# Altium footprint library SYNCBOX.PcbLib: 77 footprints (part 5 of 5)
Each footprint in its own frame and in the unit in brackets; x right, y up, seen from the top. Pads: shape width x height; smd on the part's side, far side on the other; paste and mask are expansions set on the pad; w line width, h text height; cw(c..) or ccw(c..) is an arc to the next point about the centre after c.
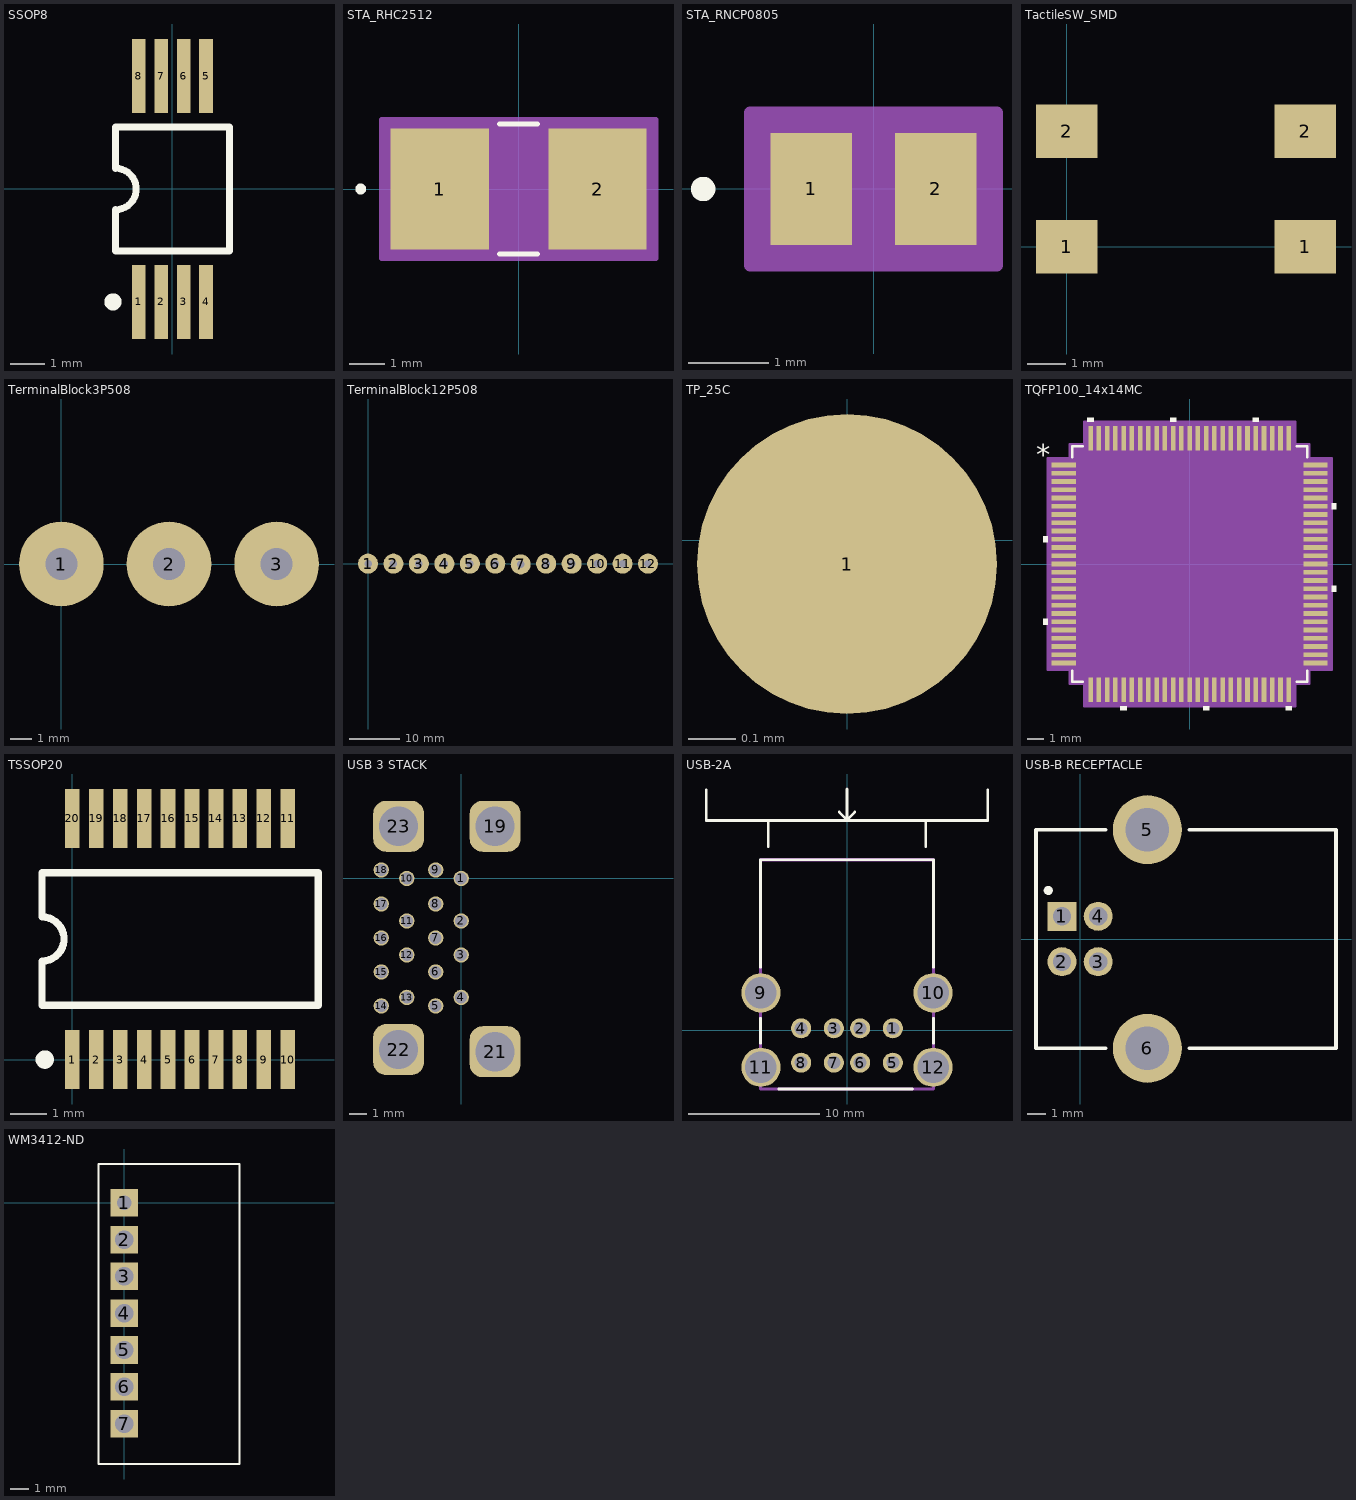
[diagram p4: the footprints below, top view; thin cyan lines are the x and y axes]

## SSOP8 [mm]
pads (8):
  rect 0.4x2.15 smd: 1(-0.975,-3.275) 2(-0.325,-3.275) 3(0.325,-3.275) 4(0.975,-3.275) 5(0.975,3.275) 6(0.325,3.275) 7(-0.325,3.275) 8(-0.975,3.275)
Top Overlay:
  circle w0.25: c-1.725,-3.275 r0.125
  lines w0.2: -1.65,-1.8 -1.65,-0.6 ccw(c-1.65,0) -1.65,0.6 -1.65,1.8 1.65,1.8 1.65,-1.8 -1.65,-1.8

## STA_RHC2512 [mil]
pads (2):
  rect 109x134 smd paste+0 mask+0: 1(-87.5,0) 2(87.5,0)
Top Overlay:
  circle w6: c-175,0 r3
  lines w6: -20.89,-72 20.89,-72 ; -20.89,72 20.89,72
Mechanical 13:
  circle w0: c-82.5,0 r3
  lines w1: -128,-67 -128,67 ; -128,-67 -33,-67 -33,67 -128,67 ; -128,-67 128,-67 ; -128,-67 -128,67 ; -128,67 128,67 ; 128,-67 33,-67 33,67 128,67 ; 128,-67 128,67 ; 128,-67 128,67
Mechanical 15:
  region: 152,-77 -152,-77 -152,77 152,77
  lines w6: -152,-77 -152,77 152,77 152,-77 -152,-77
3D body: height 10, standoff 0, extent 0,0 10,10
3D body "STA_RHC2512.stp": height 27.99, standoff 0, extent -127.99,-67 128,67.01

## STA_RNCP0805 [mil]
pads (2):
  rect 40x55 smd paste+0 mask+0: 1(-30.5,0) 2(30.5,0)
Top Overlay:
  circle w6: c-83.5,0 r3
Mechanical 13:
  circle w0: c-25.5,0 r3
  lines w1: -42.5,-27.5 -42.5,27.5 ; -42.5,-27.5 42.5,-27.5 ; -42.5,-27.5 -10.5,-27.5 -10.5,27.5 -42.5,27.5 ; -42.5,-27.5 -42.5,27.5 ; -42.5,27.5 42.5,27.5 ; 42.5,-27.5 42.5,27.5 ; 42.5,-27.5 42.5,27.5 ; 42.5,-27.5 10.5,-27.5 10.5,27.5 42.5,27.5
Mechanical 15:
  region: 60.5,-37.5 -60.5,-37.5 -60.5,37.5 60.5,37.5
  lines w6: -60.5,-37.5 60.5,-37.5 60.5,37.5 -60.5,37.5 -60.5,-37.5
3D body "STA_RNCP0805.stp": height 24.02, standoff 0, extent -42.52,-27.48 42.52,27.48
3D body: height 10, standoff 0, extent 0,0 10,10

## TactileSW_SMD [mm]
pads (4):
  rect 1.6x1.4 smd: 1(0,0) 1(6.2,0) 2(0,3) 2(6.2,3)
3D body "TL3305AFxxxxG.stp": height 3.7, standoff -0.1, extent -0.651,-0.751 6.849,3.749

## TerminalBlock3P508 [mm]
pads (3):
  round 4 hole 1.5: 1(0,0) 2(5.08,0) 3(10.16,0)

## TerminalBlock12P508 [mm]
pads (12):
  round 4 hole 1.5: 1(0,0) 2(5.08,0) 3(10.16,0) 4(15.24,0) 5(20.32,0) 6(25.4,0) 7(30.48,-0.15) 8(35.56,0) 9(40.64,0) 10(45.72,0) 11(50.8,0) 12(55.88,0)
3D body "395321012.stp": height 8.38, standoff -3.81, extent -3.569,-2.032 59.398,9.906

## TP_25C [mm]
pads (1):
  round 0.635 smd paste-0.635 mask+0.051: 1(0,-0.05)

## TQFP100_14x14MC [mil]
pads (100):
  rect 58x11 smd paste+0 mask+0: 1(-300,236.22) 2(-300,216.54) 3(-300,196.85) 4(-300,177.17) 5(-300,157.48) 6(-300,137.8) 7(-300,118.11) 8(-300,98.43) 9(-300,78.74) 10(-300,59.06) 11(-300,39.37) 12(-300,19.69) 13(-300,0) 14(-300,-19.68) 15(-300,-39.37) 16(-300,-59.06) 17(-300,-78.74) 18(-300,-98.43) 19(-300,-118.11) 20(-300,-137.8) 21(-300,-157.48) 22(-300,-177.17) 23(-300,-196.85) 24(-300,-216.54) 25(-300,-236.22) 51(300,-236.22) 52(300,-216.54) 53(300,-196.85) 54(300,-177.17) 55(300,-157.48) 56(300,-137.8) 57(300,-118.11) 58(300,-98.43) 59(300,-78.74) 60(300,-59.06) 61(300,-39.37) 62(300,-19.68) 63(300,0) 64(300,19.68) 65(300,39.37) 66(300,59.06) 67(300,78.74) 68(300,98.43) 69(300,118.11) 70(300,137.8) 71(300,157.48) 72(300,177.17) 73(300,196.85) 74(300,216.54) 75(300,236.22)
  rect 11x58 smd paste+0 mask+0: 26(-236.22,-300) 27(-216.54,-300) 28(-196.85,-300) 29(-177.17,-300) 30(-157.48,-300) 31(-137.8,-300) 32(-118.11,-300) 33(-98.43,-300) 34(-78.74,-300) 35(-59.06,-300) 36(-39.37,-300) 37(-19.68,-300) 38(0,-300) 39(19.68,-300) 40(39.37,-300) 41(59.06,-300) 42(78.74,-300) 43(98.43,-300) 44(118.11,-300) 45(137.8,-300) 46(157.48,-300) 47(177.17,-300) 48(196.85,-300) 49(216.54,-300) 50(236.22,-300) 76(236.22,300) 77(216.54,300) 78(196.85,300) 79(177.17,300) 80(157.48,300) 81(137.8,300) 82(118.11,300) 83(98.43,300) 84(78.74,300) 85(59.06,300) 86(39.37,300) 87(19.68,300) 88(0,300) 89(-19.68,300) 90(-39.37,300) 91(-59.06,300) 92(-78.74,300) 93(-98.43,300) 94(-118.11,300) 95(-137.8,300) 96(-157.48,300) 97(-177.17,300) 98(-196.85,300) 99(-216.54,300) 100(-236.22,300)
Top Overlay:
  region: -228.72,339 -243.72,339 -243.72,349 -228.72,349
  region: -31.87,339 -46.87,339 -46.87,349 -31.87,349
  region: 164.98,339 149.98,339 149.98,349 164.98,349
  region: 339,145.3 349,145.3 349,130.3 339,130.3
  region: 339,-51.56 349,-51.56 349,-66.56 339,-66.56
  region: 243.72,-339 228.72,-339 228.72,-349 243.72,-349
  region: 46.87,-339 31.87,-339 31.87,-349 46.87,-349
  region: -149.98,-339 -164.98,-339 -164.98,-349 -149.98,-349
  region: -339,-130.3 -349,-130.3 -349,-145.3 -339,-145.3
  region: -339,66.56 -349,66.56 -349,51.56 -339,51.56
  lines w6: -280.5,-254.82 -280.5,-280.5 -254.82,-280.5 ; -280.5,254.82 -280.5,280.5 -254.82,280.5 ; 254.82,-280.5 280.5,-280.5 280.5,-254.82 ; 254.82,280.5 280.5,280.5 280.5,254.82
  text "*" at -366.5,236.06 h50
Mechanical 13:
  drawing of 405 lines, arcs and shapes, not listed
  text "*" at -273,221.06 h50
Mechanical 15:
  region: -251.72,-285.5 -285.5,-285.5 -285.5,-251.72 -339,-251.72 -339,251.72 -285.5,251.72 -285.5,285.5 -251.72,285.5 -251.72,339 251.72,339 251.72,285.5 285.5,285.5 285.5,251.72 339,251.72 339,-251.72 285.5,-251.72 285.5,-285.5 251.72,-285.5 251.72,-339 -251.72,-339
  lines w6: -339,-251.72 -339,251.72 -285.5,251.72 -285.5,285.5 -251.72,285.5 -251.72,339 251.72,339 251.72,285.5 285.5,285.5 285.5,251.72 339,251.72 339,-251.72 285.5,-251.72 285.5,-285.5 251.72,-285.5 251.72,-339 -251.72,-339 -251.72,-285.5 -285.5,-285.5 -285.5,-251.72 -339,-251.72
3D body: height 10, standoff 0, extent 0,0 10,10
3D body "TQFP100_14X14MC-L.stp": height 47.09, standoff 0, extent -314.99,-314.99 315.01,315

## TSSOP20 [mm]
pads (20):
  rect 0.4x1.6 smd: 1(0,0) 2(0.65,0) 3(1.3,0) 4(1.95,0) 5(2.6,0) 6(3.25,0) 7(3.9,0) 8(4.55,0) 9(5.2,0) 10(5.85,0) 11(5.85,6.55) 12(5.2,6.55) 13(4.55,6.55) 14(3.9,6.55) 15(3.25,6.55) 16(2.6,6.55) 17(1.95,6.55) 18(1.3,6.55) 19(0.65,6.55) 20(0,6.55)
Top Overlay:
  circle w0.25: c-0.75,0 r0.125
  lines w0.2: -0.825,1.475 -0.825,2.675 ccw(c-0.825,3.275) -0.825,3.875 -0.825,5.075 6.675,5.075 6.675,1.475 -0.825,1.475
3D body: height 1.4, standoff 0.2, extent -0.075,1.79 0.323,2.189
3D body: height 0.2, standoff 0, extent 5.745,5.5 5.945,6.5
3D body: height 0.2, standoff 0, extent 5.095,5.5 5.295,6.5
3D body: height 0.2, standoff 0, extent 4.445,5.5 4.645,6.5
3D body: height 0.2, standoff 0, extent 3.795,5.5 3.995,6.5
3D body: height 0.2, standoff 0, extent 3.145,5.5 3.345,6.5
3D body: height 0.2, standoff 0, extent 2.495,5.5 2.695,6.5
3D body: height 0.2, standoff 0, extent 1.845,5.5 2.045,6.5
3D body: height 0.2, standoff 0, extent 1.195,5.5 1.395,6.5
3D body: height 0.2, standoff 0, extent 0.545,5.5 0.745,6.5
3D body: height 0.2, standoff 0, extent -0.105,5.5 0.095,6.5
3D body: height 0.2, standoff 0, extent 5.755,0 5.955,1
3D body: height 0.2, standoff 0, extent 5.105,0 5.305,1
3D body: height 0.2, standoff 0, extent 4.455,0 4.655,1
3D body: height 0.2, standoff 0, extent 3.805,0 4.005,1
3D body: height 0.2, standoff 0, extent 3.155,0 3.355,1
3D body: height 0.2, standoff 0, extent 2.505,0 2.705,1
3D body: height 0.2, standoff 0, extent 1.855,0 2.055,1
3D body: height 0.2, standoff 0, extent 1.205,0 1.405,1
3D body: height 0.2, standoff 0, extent 0.555,0 0.755,1
3D body: height 0.2, standoff 0, extent -0.095,0 0.105,1
3D body: height 1.2, standoff 0, extent -0.385,1 6.2,5.5

## USB 3 STACK [mm]
pads (22):
  round 0.9 hole 0.7: 1(0,0) 2(0,-2.5) 3(0,-4.5) 4(0,-7) 5(-1.5,-7.5) 6(-1.5,-5.5) 7(-1.5,-3.5) 8(-1.5,-1.5) 9(-1.5,0.5) 10(-3.2,0) 11(-3.2,-2.5) 12(-3.2,-4.5) 13(-3.2,-7) 14(-4.7,-7.5) 15(-4.7,-5.5) 16(-4.7,-3.5) 17(-4.7,-1.5) 18(-4.7,0.5)
  rrect50% 3x3 / inner round 2.3 / far side rrect50% 3x3 hole 2.3: 19(2,3.07)
  rrect50% 3x3 hole 2.3: 21(2,-10.197) 22(-3.68,-10.07) 23(-3.68,3.07)
Bottom Overlay:
  lines w0.102: -6.072,-11.946 11.581,-11.946 11.581,4.818 5.608,4.818 -2.359,4.818 -6.072,4.818 -6.072,-11.946
3D body "484060003.stp": height 16.2, standoff -3.2, extent -5.936,-11.377 11.524,4.293

## USB-2A [mm]
pads (12):
  round 1.524 hole 1: 1(3.5,0.13) 2(1,0.13) 3(-1,0.13) 4(-3.5,0.13) 5(3.5,-2.49) 6(1,-2.49) 7(-1,-2.49) 8(-3.5,-2.49)
  round 3 hole 2.4: 9(-6.57,2.84) 10(6.57,2.84) 11(-6.57,-2.84) 12(6.57,-2.84)
Top Overlay:
  lines w0.2: -10.75,18.35 -10.75,16 10.75,16 10.75,18.35 ; -6.6,-1 -6.6,0.9 ; -6.6,4.8 -6.6,13 6.6,13 6.6,4.8 ; -6,14 -6,16 ; -5.2,-4.5 5,-4.5 ; -0.6,16.65 0,16.05 ; 0,18.4 0,16.05 ; 0.6,16.65 0,16.05 ; 6,14 6,16 ; 6.6,-1 6.6,0.9
Mechanical 16:
  lines w0.254: -6.6,-4.5 6.6,-4.5 6.6,13 -6.6,13 -6.6,-4.5
Mechanical 29:
  text ".Designator" at -2,5.8 h1.52
3D body "c-5787617-1-c-3d.stp": height 15.78, standoff -4.37, extent -8.1,-4.1 8.139,13.08

## USB-B RECEPTACLE [mm]
pads (6):
  rect 1.6x1.6 hole 1: 1(-1,1.25)
  round 1.6 hole 1: 2(-1,-1.25) 3(1,-1.25) 4(1,1.25)
  round 3.8 hole 2.4: 5(3.71,6.02) 6(3.71,-6.02)
Top Overlay:
  circle w0.25: c-1.75,2.675 r0.125
  lines w0.2: -2.425,-3.675 -2.425,6.02 1.41,6.02 ; -2.425,-2.21 -2.425,-6.02 1.41,-6.02 ; -2.425,-0.29 -2.425,0.05 ; 6.01,-6.02 14.097,-6.02 14.097,6.02 6.01,6.02
3D body "A-USBSB (ASSMANN).stp": height 11.02, standoff -3.63, extent -2.44,-7.45 14.06,7.45

## WM3412-ND [mm]
pads (7):
  rect 1.5x1.5 hole 0.8: 1(0,0)
  rect 1.5x1.5 hole 1: 2(0,-2) 3(0,-4) 4(0,-6) 5(0,-8) 6(0,-10) 7(0,-12)
Top Overlay:
  lines w0.1: -1.397,-14.199 -1.397,2.108 6.274,2.108 6.274,-14.199 -1.397,-14.199
3D body "532540770.stp": height 4.21, standoff -3.49, extent -1.237,-14.02 6.063,1.98